# Altium footprint library SOT_SMD.PcbLib: 10 footprints
Each footprint in its own frame and in the unit in brackets; x right, y up, seen from the top. Pads: shape width x height; smd on the part's side, far side on the other; paste and mask are expansions set on the pad; w line width, h text height; cw(c..) or ccw(c..) is an arc to the next point about the centre after c.
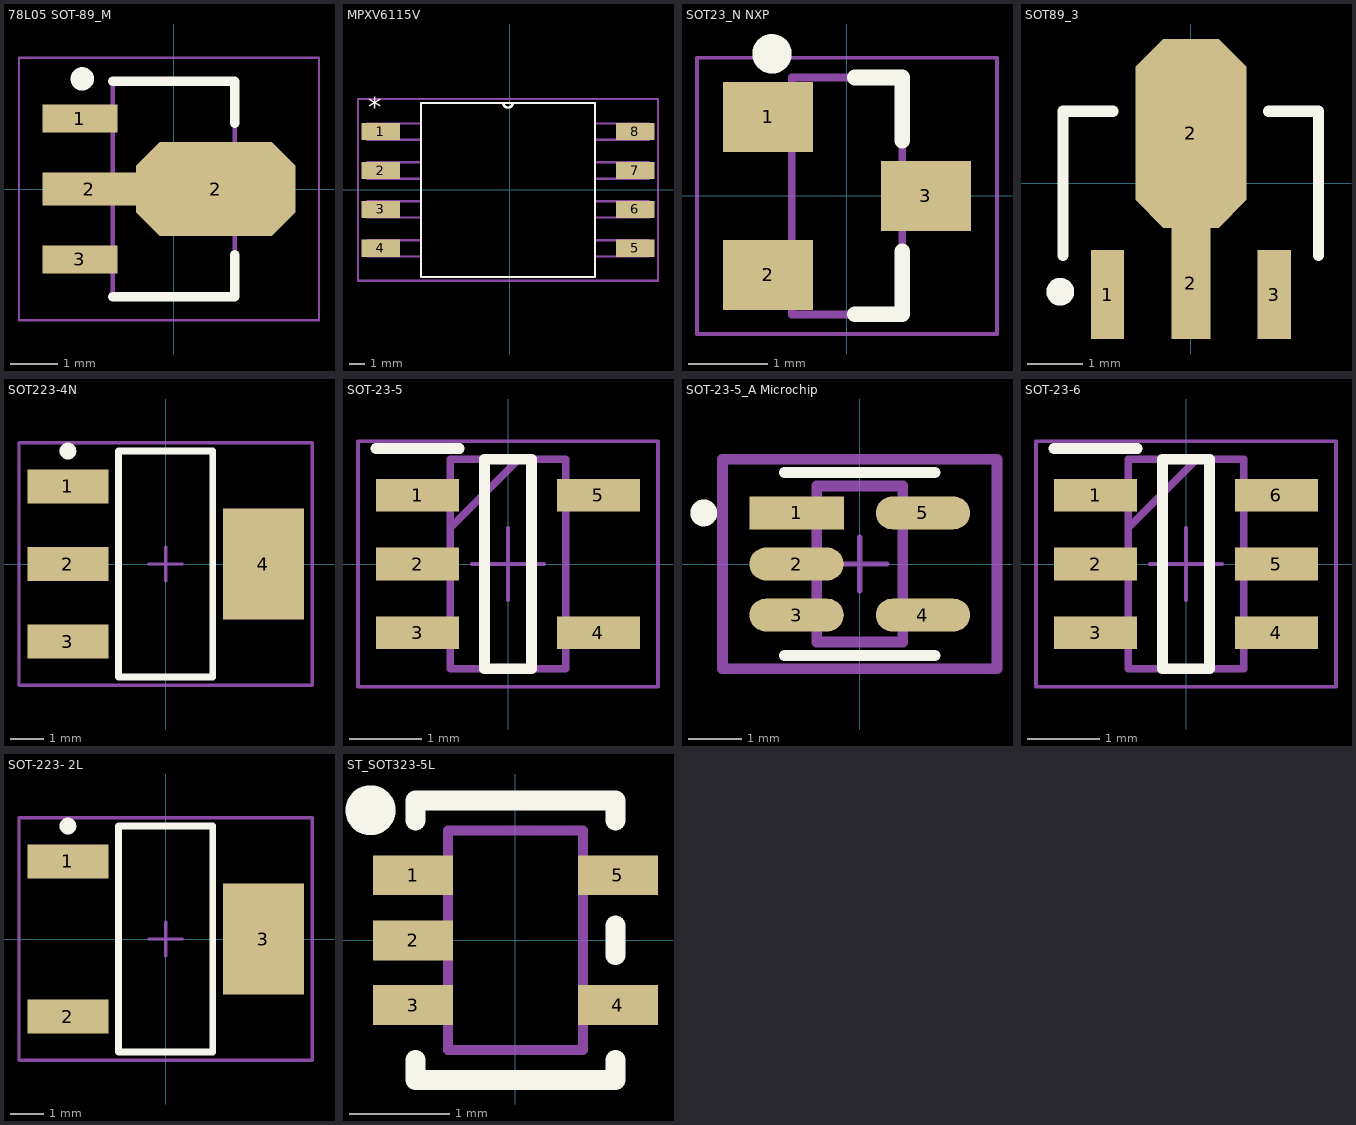
[diagram p0: the footprints below, top view; thin cyan lines are the x and y axes]

## 78L05 SOT-89_M [mm] "SOT89, 3-Leads, Body 4.5x2.4 mm, Pitch 1.5mm, Lead Span 4.1mm, IPC Low Density"
height 1.6
pads (4):
  rect 1.6x0.6 smd: 1(-2,1.5) 3(-2,-1.5)
  rect 2x0.7 smd: 2(-1.8,0)
  oct 3.4x2 smd: 2(0.9,0)
Top Overlay:
  circle w0.25: c-1.95,2.35 r0.125
  lines w0.2: -1.3,-2.3 1.3,-2.3 1.3,-1.4 ; -1.3,2.3 1.3,2.3 1.3,1.4
Top Designator (Mech4):
  text ".Designator" at -3.81,-0.344 h1.52
Mechanical 13:
  lines w0.1: -0.5,0 0.5,0 ; 0,-0.5 0,0.5 ; -1.3,-2.3 1.3,-2.3 1.3,2.3 -1.3,2.3 -1.3,-2.3
Mechanical 15:
  lines w0.05: -3.3,-2.8 3.1,-2.8 3.1,2.8 -3.3,2.8 -3.3,-2.8
3D body "SW3dPS-SOT89.STEP": height 1.59, standoff -0.02, extent -2.259,-2.3 1.991,2.3

## MPXV6115V [mil]
pads (8):
  rect 99x44 smd: 1(-332,150) 2(-332,50) 3(-332,-50) 4(-332,-150) 5(322,-150) 6(322,-50) 7(322,50) 8(322,150)
Top Overlay:
  lines w6: -17,224 ccw(c-5,224) 7,224 ; -17,224 -229,224 -229,-224 219,-224 219,224 7,224 ; -17,224 7,224
  text "*" at -365,189 h50
Mechanical 13:
  lines w6: -17,224 ccw(c-5,224) 7,224 ; -17,224 7,224 ; -17,224 -229,224 -229,-224 219,-224 219,224 7,224 ; -367,-171 -229,-171 -229,-129 -367,-129 -367,-171 ; -367,-71 -229,-71 -229,-29 -367,-29 -367,-71 ; -367,29 -229,29 -229,71 -367,71 -367,29 ; -367,129 -229,129 -229,171 -367,171 -367,129 ; 219,-171 219,-129 357,-129 357,-171 219,-171 ; 219,-71 219,-29 357,-29 357,-71 219,-71 ; 219,29 219,71 357,71 357,29 219,29 ; 219,129 219,171 357,171 357,129 219,129
  text "*" at -365,189 h50
Mechanical 15:
  lines w6: -391,-234 381,-234 381,234 -391,234 -391,-234

## SOT23_N NXP [mil] "SOT23, 3-Leads, Body 3x1.4mm, Pitch 0.95mm, IPC Medium Density"
height 43.31
pads (3):
  rect 45x35 smd: 1(-39.37,39.37) 2(-39.37,-39.37) 3(39.37,0)
Top Overlay:
  circle w9.84: c-37.4,70.87 r4.92
  lines w7.87: 3.94,-59.06 27.56,-59.06 27.56,-27.56 ; 3.94,59.06 27.56,59.06 27.56,27.56
Top Designator:
  lines w3.94: -27.56,-59.06 27.56,-59.06 27.56,59.06 -27.56,59.06 -27.56,-59.06
Top Designator (Mech4):
  text ".Designator" at -146.08,-8.13 h60
Mechanical 15:
  lines w1.97: -74.8,-68.9 -74.8,68.9 74.8,68.9 74.8,-68.9 -74.8,-68.9
3D body "SOT-23.stp": height 39.37, standoff 0, extent -50.2,-59.05 50.19,59.06

## SOT89_3 [mm] "SOT89, SOT-89, SBF-4089, SOT89A, GALI, SC-62, DF782, TO-243AA(JEDEC), 1.5mm pitch"
pads (4):
  rect 0.6x1.6 smd: 1(-1.5,-2) 3(1.5,-2)
  rect 0.7x2 smd: 2(0,-1.8)
  oct 2x3.4 smd: 2(0,0.9)
Top Overlay:
  circle w0.25: c-2.35,-1.95 r0.125
  lines w0.2: -2.3,-1.3 -2.3,1.3 -1.4,1.3 ; 1.4,1.3 2.3,1.3 2.3,-1.3
Top Designator (Mech4):
  text ".Designator" at -3.81,-0.444 h1.52
3D body "SW3dPS-SOT89.STEP": height 1.59, standoff -0.02, extent -2.3,-2.259 2.3,1.991

## SOT223-4N [mm] "SOT223, 4-Leads, Body 6.5x3.5mm, Pitch 2.3mm, Lead Span 7mm, IPC Medium Density"
height 1.8
pads (4):
  rect 2.4x1 smd: 1(-2.9,2.3) 2(-2.9,0) 3(-2.9,-2.3)
  rect 2.4x3.3 smd: 4(2.9,0)
Top Overlay:
  circle w0.25: c-2.9,3.35 r0.125
  lines w0.2: -1.4,-3.35 -1.4,3.35 1.4,3.35 1.4,-3.35 -1.4,-3.35
Top Designator (Mech4):
  text ".Designator" at -3.71,-0.344 h1.52
Mechanical 13:
  lines w0.1: -0.5,0 0.5,0 ; 0,-0.5 0,0.5
Mechanical 15:
  lines w0.1: -4.35,-3.6 -4.35,3.6 4.35,3.6 4.35,-3.6 -4.35,-3.6
3D body "SW3dPS-Regulator.STEP": height 1.72, standoff 0.02, extent -3.395,-3.274 3.496,3.226

## SOT-23-5 [mm]
pads (5):
  rect 1.15x0.45 smd: 1(-1.25,0.95) 2(-1.25,0) 3(-1.25,-0.95) 4(1.25,-0.95) 5(1.25,0.95)
Top Overlay:
  lines w0.15: -1.825,1.6 -0.675,1.6 ; -0.325,-1.45 0.325,-1.45 0.325,1.45 -0.325,1.45 -0.325,-1.45
Top Designator (Mech4):
  text ".Designator" at -3.71,-0.344 h1.52
Mechanical 13:
  lines w0.051: -0.5,0 0.5,0 ; 0,-0.5 0,0.5
  lines w0.1: -0.8,0.5 0.15,1.45 ; -0.8,-1.45 0.8,-1.45 0.8,1.45 -0.8,1.45 -0.8,-1.45
Mechanical 15:
  lines w0.05: -2.075,-1.7 2.075,-1.7 2.075,1.7 -2.075,1.7 -2.075,-1.7
3D body "HY2213-BB3A.stp": height 1.4, standoff 0, extent -1.4,-1.45 1.4,1.45

## SOT-23-5_A Microchip [mm]
pads (5):
  rect 1.756x0.61 smd paste+0 mask+0: 1(-1.175,0.95)
  rrect100% 1.756x0.61 smd paste+0 mask+0: 2(-1.175,0) 3(-1.175,-0.95) 4(1.175,-0.95) 5(1.175,0.95)
Top Overlay:
  circle w0.25: c-2.903,0.95 r0.125
  lines w0.2: -1.4,-1.7 1.4,-1.7 ; -1.4,1.7 1.4,1.7
Top Designator (Mech4):
  text ".Designator" at -3.96,-0.344 h1.52
Mechanical 10:
  lines w0.2: -2.553,-1.95 -2.553,1.95 2.553,1.95 2.553,-1.95 -2.553,-1.95
Mechanical 12:
  lines w0.2: -0.8,-1.45 -0.8,1.45 0.8,1.45 0.8,-1.45 -0.8,-1.45
Mechanical 13:
  lines w0.1: -0.5,0 0.5,0 ; 0,-0.5 0,0.5
Mechanical 15:
  lines w0.2: -2.553,-1.95 -2.553,1.95 2.553,1.95 2.553,-1.95 -2.553,-1.95
3D body "_Microchip_MIC5205-3.3YM5-TR_eec.STEP": height 1.3, standoff 0, extent -1.4,-1.455 1.4,1.455

## SOT-23-6 [mm]
pads (6):
  rect 1.15x0.45 smd: 1(-1.25,0.95) 2(-1.25,0) 3(-1.25,-0.95) 4(1.25,-0.95) 5(1.25,0) 6(1.25,0.95)
Top Overlay:
  lines w0.15: -1.825,1.6 -0.675,1.6 ; -0.325,-1.45 -0.325,1.45 0.325,1.45 0.325,-1.45 -0.325,-1.45
Top Designator (Mech4):
  text ".Designator" at -3.71,-0.344 h1.52
Mechanical 13:
  lines w0.051: -0.5,0 0.5,0 ; 0,-0.5 0,0.5
  lines w0.1: -0.8,0.5 0.15,1.45 ; -0.8,-1.45 -0.8,1.45 0.8,1.45 0.8,-1.45 -0.8,-1.45
Mechanical 15:
  lines w0.05: -2.075,-1.7 -2.075,1.7 2.075,1.7 2.075,-1.7 -2.075,-1.7
3D body "HY2213-BB3A.stp": height 1.4, standoff 0, extent -1.4,-1.45 1.4,1.45

## SOT-223- 2L [mm]
height 1.8
pads (3):
  rect 2.4x1 smd: 1(-2.9,2.3) 2(-2.9,-2.3)
  rect 2.4x3.3 smd: 3(2.9,0)
Top Overlay:
  circle w0.25: c-2.9,3.35 r0.125
  lines w0.2: -1.4,-3.35 1.4,-3.35 1.4,3.35 -1.4,3.35 -1.4,-3.35
Top Designator (Mech4):
  text ".Designator" at -3.71,-0.344 h1.52
Mechanical 13:
  lines w0.1: -0.5,0 0.5,0 ; 0,-0.5 0,0.5
Mechanical 15:
  lines w0.1: -4.35,-3.6 4.35,-3.6 4.35,3.6 -4.35,3.6 -4.35,-3.6
3D body "SW3dPS-Regulator.STEP": height 1.72, standoff 0.02, extent -3.395,-3.274 3.496,3.226

## ST_SOT323-5L [mm]
height 1.1
pads (5):
  rect 0.8x0.4 smd: 1(-1.025,0.65) 2(-1.025,0) 3(-1.025,-0.65) 4(1.025,-0.65) 5(1.025,0.65)
Top Overlay:
  circle w0.25: c-1.45,1.3 r0.125
  lines w0.2: -1,-1.2 -1,-1.4 -0.437,-1.4 0.437,-1.4 1,-1.4 1,-1.2 ; -1,1.2 -1,1.397 1,1.397 1,1.2 ; 1,-0.15 1,0.15
Top Designator (Mech4):
  text ".Designator" at -3.797,-0.319 h1.52
Mechanical 13:
  lines w0.1: -0.675,-1.1 -0.675,1.1 0.675,1.1 0.675,-1.1 -0.675,-1.1
3D body "ST_SOT323-5L.step": height 1.1, standoff 0, extent -1.2,-1.1 1.2,1.1